# Altium footprint library Footprint-Lib-PhilsLab.PcbLib: 544 footprints (part 9 of 34)
Each footprint in its own frame and in the unit in brackets; x right, y up, seen from the top. Pads: shape width x height; smd on the part's side, far side on the other; paste and mask are expansions set on the pad; w line width, h text height; cw(c..) or ccw(c..) is an arc to the next point about the centre after c.
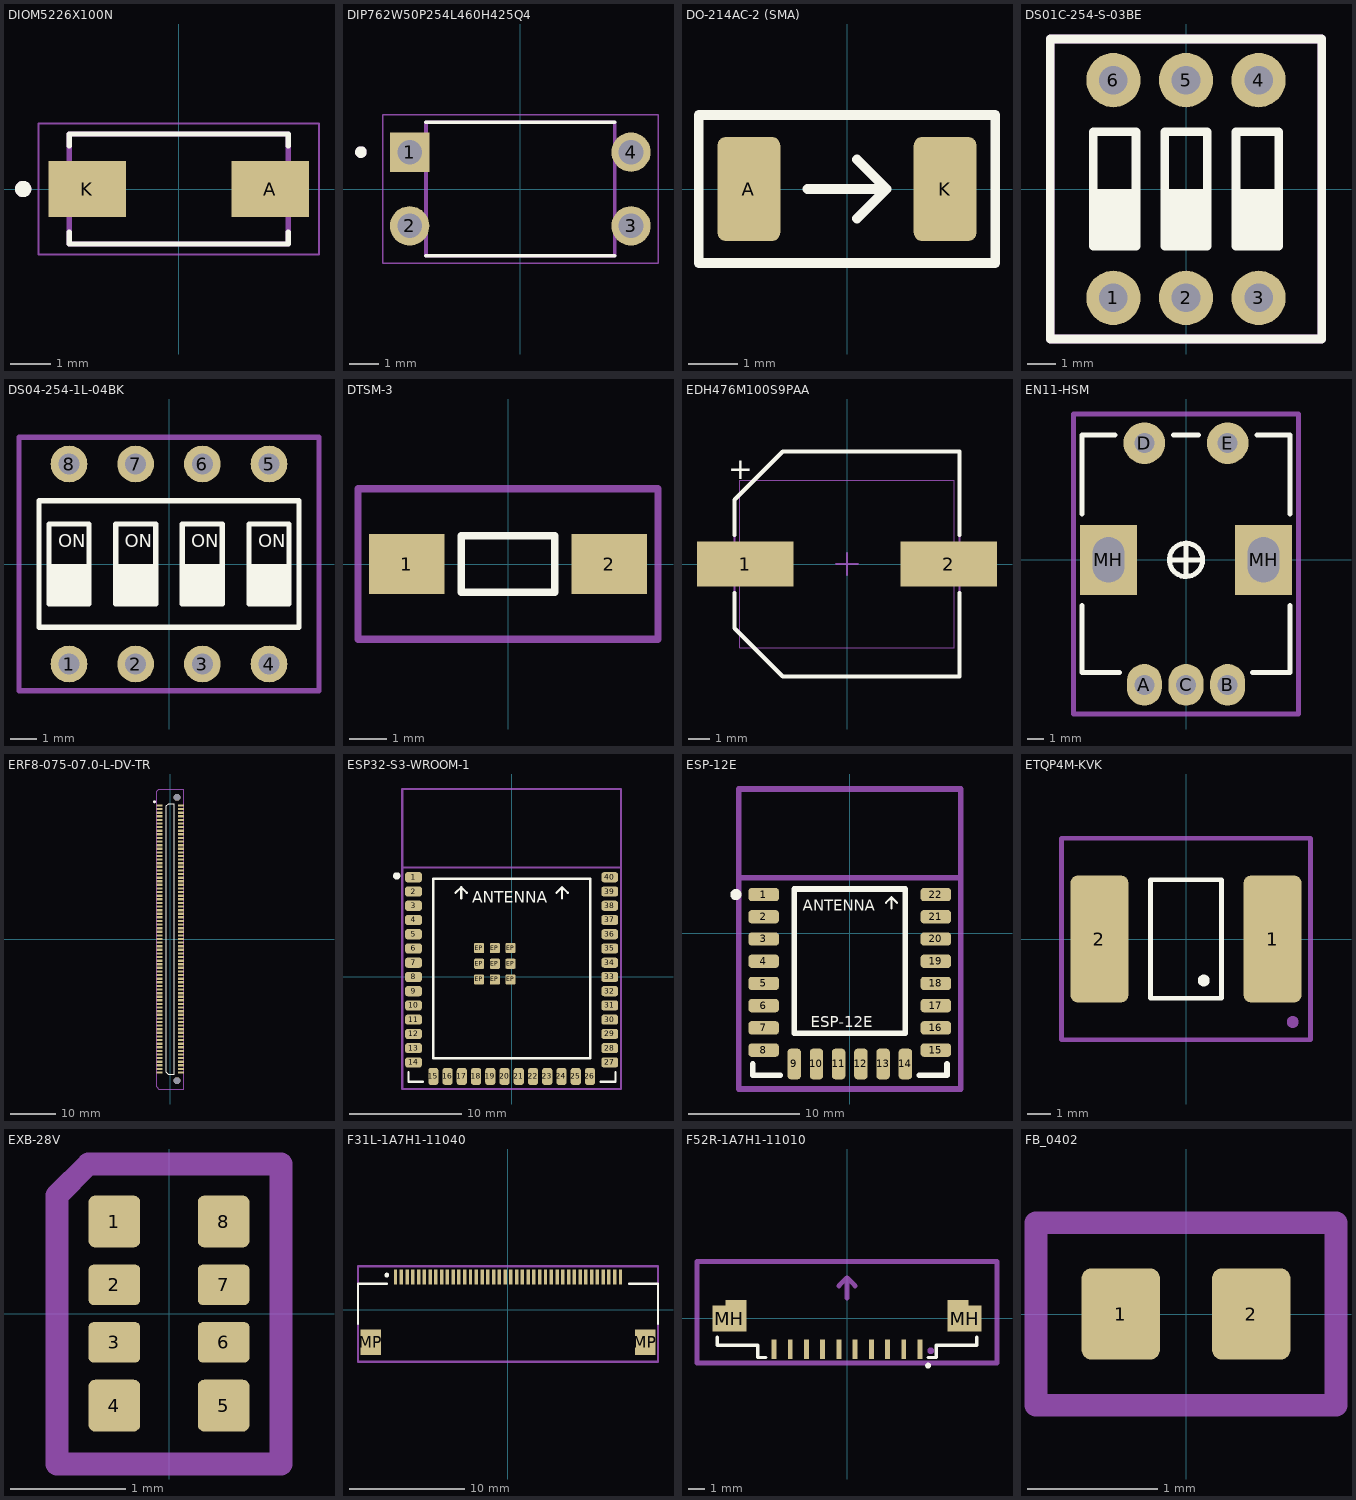
[diagram p8: the footprints below, top view; thin cyan lines are the x and y axes]

## DIOM5226X100N [mm]
pads (2):
  rect 1.89x1.38 smd: A(2.24,0) K(-2.24,0)
Top Overlay:
  circle w0.2: c-3.81,0 r0.1
  lines w0.127: -2.68,-1.05 -2.68,-1.35 2.68,-1.35 2.68,-1.05 ; -2.68,1.05 -2.68,1.35 2.68,1.35 2.68,1.05
Mechanical 13:
  circle w0.2: c-3.81,0 r0.1
  lines w0.127: -2.68,-1.35 -2.68,1.35 2.68,1.35 2.68,-1.35 -2.68,-1.35
Mechanical 15:
  lines w0.05: -3.435,-1.6 -3.435,1.6 3.435,1.6 3.435,-1.6 -3.435,-1.6
3D body "SS54FSH.STEP": height 1.1, standoff 0, extent -2.4,-1.149 2.3,1.349

## DIP762W50P254L460H425Q4 [mm]
height 4.25
pads (4):
  rect 1.358x1.358 / inner round 1.358 / far side rect 1.358x1.358 hole 0.85 mask+0.102: 1(-3.81,1.27)
  round 1.358 hole 0.85 mask+0.102: 2(-3.81,-1.27) 3(3.81,-1.27) 4(3.81,1.27)
Top Overlay:
  circle w0.2: c-5.489,1.27 r0.1
  lines w0.127: -3.25,-2.3 3.25,-2.3 ; -3.25,2.3 3.25,2.3
Mechanical 13:
  circle w0.2: c-5.489,1.27 r0.1
  lines w0.127: -3.25,-2.3 -3.25,2.3 3.25,2.3 3.25,-2.3 -3.25,-2.3
Mechanical 15:
  lines w0.05: -4.739,-2.55 -4.739,2.55 4.739,2.55 4.739,-2.55 -4.739,-2.55
3D body "step_temp.STEP": height 4.6, standoff -3.2, extent -3.94,-2.3 3.94,2.3

## DO-214AC-2 (SMA) [mm]
pads (2):
  rrect25% 1.27x2.1 smd: A(-1.985,0) K(1.985,0)
Top Overlay:
  lines w0.2: -0.8,0 0.8,0 ; 0.2,-0.6 0.8,0 ; 0.2,0.6 0.8,0 ; 0.8,0 0.8,0 ; -3,-1.5 -3,1.5 3,1.5 3,-1.5 -3,-1.5
Mechanical 13:
  text "'.Designator'" at -5.84,-0.925 h1
3D body "DO-214AC_SMA.step": height 2.42, standoff 0.01, extent -2.6,-1.3 2.6,1.3

## DS01C-254-S-03BE [mm]
pads (6):
  round 1.9 hole 1: 1(-2.54,-3.81) 2(0,-3.81) 3(2.54,-3.81) 4(2.54,3.81) 5(0,3.81) 6(-2.54,3.81)
Top Overlay:
  rectangle: 1.75,-2 3.25,0
  rectangle: -0.75,-2 0.75,0
  rectangle: -3.25,-2 -1.75,0
  lines w0.3: -4.75,-5.25 -4.75,5.25 4.75,5.25 4.75,-5.25 -4.75,-5.25 ; -3.25,-2 -1.75,-2 -1.75,2 -3.25,2 -3.25,-2 ; -0.75,-2 0.75,-2 0.75,2 -0.75,2 -0.75,-2 ; 1.75,-2 3.25,-2 3.25,2 1.75,2 1.75,-2
Mechanical 13:
  lines w0.3: -4.75,-5.25 -4.75,5.25 4.75,5.25 4.75,-5.25 -4.75,-5.25
  text "ON" at -4.083,3.5 h1
  text "'.Designator'" at -5.665,-0.417 h1
3D body "DS01-254-S-03BE.step": height 6.56, standoff -2.99, extent -4.525,-4.95 4.515,4.95

## DS04-254-1L-04BK [mm]
pads (8):
  round 1.4 hole 0.8: 1(-3.81,-3.81) 2(-1.27,-3.81) 3(1.27,-3.81) 4(3.81,-3.81) 5(3.81,3.81) 6(1.27,3.81) 7(-1.27,3.81) 8(-3.81,3.81)
Top Overlay:
  rectangle: -4.572,-1.524 -3.048,0
  rectangle: -2.032,-1.524 -0.508,0
  rectangle: 0.508,-1.524 2.032,0
  rectangle: 3.048,-1.524 4.572,0
  lines w0.2: -4.953,-2.413 -4.953,2.413 4.953,2.413 4.953,-2.413 -4.953,-2.413 ; -4.572,-1.524 -3.048,-1.524 -3.048,1.524 -4.572,1.524 -4.572,-1.524 ; -2.032,-1.524 -0.508,-1.524 -0.508,1.524 -2.032,1.524 -2.032,-1.524 ; 0.508,-1.524 2.032,-1.524 2.032,1.524 0.508,1.524 0.508,-1.524 ; 3.048,-1.524 4.572,-1.524 4.572,1.524 3.048,1.524 3.048,-1.524
  text "ON" at -4.227,0.639 h0.5
  text "ON" at -1.687,0.639 h0.5
  text "ON" at 0.853,0.639 h0.5
  text "ON" at 3.393,0.639 h0.5
Mechanical 13:
  lines w0.2: -5.715,-4.826 -5.715,4.826 5.715,4.826 5.715,-4.826 -5.715,-4.826
  text ".Designator" at -4.998,-0.333 h1
  text "ON" at -4.643,1.532 h1
3D body "DS04-254-1L-04BK.step": height 4.04, standoff -4.45, extent -5.577,-3.912 5.583,3.958

## DTSM-3 [mm]
pads (2):
  rect 2x1.6 smd: 1(-2.7,0) 2(2.7,0)
Top Overlay:
  lines w0.2: -1.25,-0.75 1.25,-0.75 1.25,0.75 -1.25,0.75 -1.25,-0.75
Mechanical 13:
  lines w0.2: -4,-2 4,-2 4,2 -4,2 -4,-2
  text ".Designator" at -4.998,-0.333 h1
3D body "DTSM-32.STEP": height 4.96, standoff -0.04, extent -3.6,-1.75 3.6,1.75

## EDH476M100S9PAA [mm]
height 10.5
pads (2):
  rect 4.5x2.1 smd: 1(-4.75,0) 2(4.75,0)
Top Overlay:
  lines w0.2: -5.25,-1.35 -5.25,-3 -3,-5.25 5.25,-5.25 5.25,-1.35 ; -5.25,1.35 -5.25,3 -3,5.25 5.25,5.25 5.25,1.35
  text "+" at -5.55,3.95 h1
Mechanical 13:
  lines w0.1: -5.25,-3 -3,-5.25 5.25,-5.25 5.25,5.25 -3,5.25 -5.25,3 -5.25,-3
  text "'.Designator'" at -5.815,-0.9 h1
  text "+" at -10.565,3.85 h1
Mechanical 15:
  lines w0.05: -5,-3.9 -5,3.9 5,3.9 5,-3.9 -5,-3.9
  lines w0.1: -0.5,0 0.5,0 ; 0,-0.5 0,0.5
3D body "EDH476M100S9PAA.stp": height 10.52, standoff 0.01, extent -6.1,-5.25 6.1,5.25

## EN11-HSM [mm]
pads (7):
  oval 2.1x2.5 hole 1.2: A(-2.5,-7.5) B(2.5,-7.5) C(0,-7.5)
  round 2.5 hole 1.2: D(-2.5,7) E(2.5,7)
  rect 3.4x4.2 hole 1.9 slot 2.7 at 90 deg: MH(-4.65,0) MH(4.65,0)
Top Overlay:
  circle w0.3: c0,0 r1
  lines w0.3: -6.25,-2.75 -6.25,-6.75 -4,-6.75 ; -6.25,2.75 -6.25,7.5 -4.25,7.5 ; -1,0 1,0 ; -0.75,7.5 0.75,7.5 ; 0,-1 0,1 ; 4,-6.75 6.25,-6.75 6.25,-2.75 ; 4.25,7.5 6.25,7.5 6.25,2.75
Mechanical 13:
  lines w0.3: -6.75,-9.25 -6.75,8.75 6.75,8.75 6.75,-9.25 -6.75,-9.25
  text "'.Designator'" at -5.665,-0.417 h1
3D body "EN11-HSM1AF15.STEP": height 21.65, standoff -3.45, extent -5.85,-7.625 5.85,7.25

## ERF8-075-07.0-L-DV-TR [mm]
pads (152):
  rect 1.4x0.5 smd: 1(-2.4,29.6) 2(2.4,29.6) 3(-2.4,28.8) 4(2.4,28.8) 5(-2.4,28) 6(2.4,28) 7(-2.4,27.2) 8(2.4,27.2) 9(-2.4,26.4) 10(2.4,26.4) 11(-2.4,25.6) 12(2.4,25.6) 13(-2.4,24.8) 14(2.4,24.8) 15(-2.4,24) 16(2.4,24) 17(-2.4,23.2) 18(2.4,23.2) 19(-2.4,22.4) 20(2.4,22.4) 21(-2.4,21.6) 22(2.4,21.6) 23(-2.4,20.8) 24(2.4,20.8) 25(-2.4,20) 26(2.4,20) 27(-2.4,19.2) 28(2.4,19.2) 29(-2.4,18.4) 30(2.4,18.4) 31(-2.4,17.6) 32(2.4,17.6) 33(-2.4,16.8) 34(2.4,16.8) 35(-2.4,16) 36(2.4,16) 37(-2.4,15.2) 38(2.4,15.2) 39(-2.4,14.4) 40(2.4,14.4) 41(-2.4,13.6) 42(2.4,13.6) 43(-2.4,12.8) 44(2.4,12.8) 45(-2.4,12) 46(2.4,12) 47(-2.4,11.2) 48(2.4,11.2) 49(-2.4,10.4) 50(2.4,10.4) 51(-2.4,9.6) 52(2.4,9.6) 53(-2.4,8.8) 54(2.4,8.8) 55(-2.4,8) 56(2.4,8) 57(-2.4,7.2) 58(2.4,7.2) 59(-2.4,6.4) 60(2.4,6.4) 61(-2.4,5.6) 62(2.4,5.6) 63(-2.4,4.8) 64(2.4,4.8) 65(-2.4,4) 66(2.4,4) 67(-2.4,3.2) 68(2.4,3.2) 69(-2.4,2.4) 70(2.4,2.4) 71(-2.4,1.6) 72(2.4,1.6) 73(-2.4,0.8) 74(2.4,0.8) 75(-2.4,0) 76(2.4,0) 77(-2.4,-0.8) 78(2.4,-0.8) 79(-2.4,-1.6) 80(2.4,-1.6) 81(-2.4,-2.4) 82(2.4,-2.4) 83(-2.4,-3.2) 84(2.4,-3.2) 85(-2.4,-4) 86(2.4,-4) 87(-2.4,-4.8) 88(2.4,-4.8) 89(-2.4,-5.6) 90(2.4,-5.6) 91(-2.4,-6.4) 92(2.4,-6.4) 93(-2.4,-7.2) 94(2.4,-7.2) 95(-2.4,-8) 96(2.4,-8) 97(-2.4,-8.8) 98(2.4,-8.8) 99(-2.4,-9.6) 100(2.4,-9.6) 101(-2.4,-10.4) 102(2.4,-10.4) 103(-2.4,-11.2) 104(2.4,-11.2) 105(-2.4,-12) 106(2.4,-12) 107(-2.4,-12.8) 108(2.4,-12.8) 109(-2.4,-13.6) 110(2.4,-13.6) 111(-2.4,-14.4) 112(2.4,-14.4) 113(-2.4,-15.2) 114(2.4,-15.2) 115(-2.4,-16) 116(2.4,-16) 117(-2.4,-16.8) 118(2.4,-16.8) 119(-2.4,-17.6) 120(2.4,-17.6) 121(-2.4,-18.4) 122(2.4,-18.4) 123(-2.4,-19.2) 124(2.4,-19.2) 125(-2.4,-20) 126(2.4,-20) 127(-2.4,-20.8) 128(2.4,-20.8) 129(-2.4,-21.6) 130(2.4,-21.6) 131(-2.4,-22.4) 132(2.4,-22.4) 133(-2.4,-23.2) 134(2.4,-23.2) 135(-2.4,-24) 136(2.4,-24) 137(-2.4,-24.8) 138(2.4,-24.8) 139(-2.4,-25.6) 140(2.4,-25.6) 141(-2.4,-26.4) 142(2.4,-26.4) 143(-2.4,-27.2) 144(2.4,-27.2) 145(-2.4,-28) 146(2.4,-28) 147(-2.4,-28.8) 148(2.4,-28.8) 149(-2.4,-29.6) 150(2.4,-29.6)
  round 1.5 hole 1.5 unplated: MH(1.5,-31.4) MH(1.5,31.4)
Top Overlay:
  circle w0.3: c-3.498,30.405 r0.15
  lines w0.2: -0.865,-29.535 -0.865,29.5 -0.365,30 0.865,30 0.865,-30 -0.4,-30 -0.865,-29.535
Mechanical 13:
  circle w0.3: c-3.496,30.405 r0.15
  lines w0.25: -3,-32.75 -3,32.75 -2.5,33.25 3,33.25 3,-33.25 -2.5,-33.25 -3,-32.75
  text "'.Designator'" at -5.815,-0.9 h1
3D body "ERF8-075-07.0-L-DV-TR.stp": height 7.28, standoff -1.01, extent -2.8,-33 2.8,33

## ESP32-S3-WROOM-1 [mm]
pads (49):
  rrect50% 1.5x0.9 smd: 1(-8.75,8.88) 2(-8.75,7.61) 3(-8.75,6.34) 4(-8.75,5.07) 5(-8.75,3.8) 6(-8.75,2.53) 7(-8.75,1.26) 8(-8.75,-0.01) 9(-8.75,-1.28) 10(-8.75,-2.55) 11(-8.75,-3.82) 12(-8.75,-5.09) 13(-8.75,-6.36) 14(-8.75,-7.63) 27(8.75,-7.63) 28(8.75,-6.36) 29(8.75,-5.09) 30(8.75,-3.82) 31(8.75,-2.55) 32(8.75,-1.28) 33(8.75,-0.01) 34(8.75,1.26) 35(8.75,2.53) 36(8.75,3.8) 37(8.75,5.07) 38(8.75,6.34) 39(8.75,7.61) 40(8.75,8.88)
  rrect50% 0.9x1.5 smd: 15(-6.985,-8.88) 16(-5.715,-8.88) 17(-4.445,-8.88) 18(-3.175,-8.88) 19(-1.905,-8.88) 20(-0.635,-8.88) 21(0.635,-8.88) 22(1.905,-8.88) 23(3.175,-8.88) 24(4.445,-8.88) 25(5.715,-8.88) 26(6.985,-8.88)
  rrect25% 0.9x0.9 smd: EP(-2.9,-0.235) EP(-2.9,1.165) EP(-2.9,2.565) EP(-1.5,-0.235) EP(-1.5,1.165) EP(-1.5,2.565) EP(-0.1,-0.235) EP(-0.1,1.165) EP(-0.1,2.565)
Top Overlay:
  circle w0.35: c-10.25,9 r0.15
  lines w0.2: -9.2,-8.5 -9.2,-9.364 -7.9,-9.364 ; -5,7.5 -4.5,8 ; -4.5,7 -4.5,8 ; -4,7.5 -4.5,8 ; 4,7.5 4.5,8 ; 4.5,7 4.5,8 ; 5,7.5 4.5,8 ; 7.95,-9.364 9.25,-9.364 9.25,-8.5 ; -7,-7.25 -7,8.75 7,8.75 7,-7.25 -7,-7.25
  text "ANTENNA" at -3.532,6.6 h1
Mechanical 13:
  circle w0.35: c-8.796,8.893 r0.15
  lines w0.2: -9.75,9.75 9.75,9.75 ; -9.75,-10 -9.75,16.75 9.75,16.75 9.75,-10 -9.5,-10 -9.75,-10
  text "'.Designator'" at -5.815,-0.9 h1
  text "ANTENNA / KEEP-OUT" at -7.964,10.391 h2
3D body "ESP32-S3-WROOM.step": height 3.18, standoff 0.02, extent -9.01,-9.14 9.01,16.37

## ESP-12E [mm]
pads (22):
  rrect50% 2.75x1.2 smd: 1(-7.75,3.5) 2(-7.75,1.5) 3(-7.75,-0.5) 4(-7.75,-2.5) 5(-7.75,-4.5) 6(-7.75,-6.5) 7(-7.75,-8.5) 8(-7.75,-10.5) 15(7.75,-10.5) 16(7.75,-8.5) 17(7.75,-6.5) 18(7.75,-4.5) 19(7.75,-2.5) 20(7.75,-0.5) 21(7.75,1.5) 22(7.75,3.5)
  rrect50% 1.2x2.75 smd: 9(-5,-11.75) 10(-3,-11.75) 11(-1,-11.75) 12(1,-11.75) 13(3,-11.75) 14(5,-11.75)
Top Overlay:
  circle w0.5: c-10.25,3.5 r0.25
  lines w0.2: 3.25,2.75 3.75,3.25 ; 3.75,2.25 3.75,3.25 ; 4.25,2.75 3.75,3.25
  lines w0.5: -8.75,-11.75 -8.75,-12.75 -6.25,-12.75 ; 6.25,-12.75 8.75,-12.75 8.75,-11.75 ; -5,-9 5,-9 5,4 -5,4 -5,-9
  text "ANTENNA" at -4.25,2.05 h1
  text "ESP-12E" at -3.532,-8.45 h1
Mechanical 13:
  circle w0.5: c-7.75,3.5 r0.25
  lines w0.5: -10,5 10,5 ; -10,-14 -10,13 10,13 10,-14 0,-14 -10,-14
  text "'.Designator'" at -5.815,-0.9 h1
  text "ANTENNA / KEEP-OUT" at -5.948,6.911 h1.5
3D body "ESP-12E.step": height 2.66, standoff -0.02, extent -8.005,-12.005 8.005,12

## ETQP4M-KVK [mm]
pads (2):
  rrect25% 2.45x5.35 smd: 1(3.65,0) 2(-3.65,0)
Top Overlay:
  circle w0.3: c0.75,-1.75 r0.101
  lines w0.2: -1.5,-2.5 1.5,-2.5 1.5,2.5 -1.5,2.5 -1.5,-2.5
Mechanical 13:
  circle w0.3: c4.5,-3.5 r0.101
  lines w0.2: -5.25,-4.25 5.25,-4.25 5.25,4.25 -5.25,4.25 -5.25,-4.25
  text "'.Designator'" at -5.665,-0.417 h1
3D body "ETQ-P4M2R2KVK.stp": height 4.01, standoff 0.01, extent -4.25,-4 4.25,4

## EXB-28V [mm]
pads (8):
  rrect25% 0.45x0.45 smd mask+0.1: 1(-0.475,0.8) 4(-0.475,-0.8) 5(0.475,-0.8) 8(0.475,0.8)
  rrect25% 0.45x0.35 smd mask+0.1: 2(-0.475,0.25) 3(-0.475,-0.25) 6(0.475,-0.25) 7(0.475,0.25)
Mechanical 13:
  lines w0.2: -0.975,-1.308 0.975,-1.308 0.975,1.3 -0.7,1.3 -0.975,1.025 -0.975,-1.308
  text "'.Designator'" at -5.665,-0.417 h1
3D body "R-Array-0402.step": height 0.45, standoff 0, extent -0.5,-1 0.5,1

## F31L-1A7H1-11040 [mm]
pads (42):
  rect 0.3x1.3 smd: 1(-9.75,2.825) 2(-9.25,2.825) 3(-8.75,2.825) 4(-8.25,2.825) 5(-7.75,2.825) 6(-7.25,2.825) 7(-6.75,2.825) 8(-6.25,2.825) 9(-5.75,2.825) 10(-5.25,2.825) 11(-4.75,2.825) 12(-4.25,2.825) 13(-3.75,2.825) 14(-3.25,2.825) 15(-2.75,2.825) 16(-2.25,2.825) 17(-1.75,2.825) 18(-1.25,2.825) 19(-0.75,2.825) 20(-0.25,2.825) 21(0.25,2.825) 22(0.75,2.825) 23(1.25,2.825) 24(1.75,2.825) 25(2.25,2.825) 26(2.75,2.825) 27(3.25,2.825) 28(3.75,2.825) 29(4.25,2.825) 30(4.75,2.825) 31(5.25,2.825) 32(5.75,2.825) 33(6.25,2.825) 34(6.75,2.825) 35(7.25,2.825) 36(7.75,2.825) 37(8.25,2.825) 38(8.75,2.825) 39(9.25,2.825) 40(9.75,2.825)
  rect 1.8x2.2 smd: MP(-11.9,-2.825) MP(11.9,-2.825)
Top Overlay:
  circle w0.254: c-10.5,3 r0.079
  lines w0.2: -13,-1.25 -13,2.25 -10.5,2.25 ; 10.5,2.25 13,2.25 13,-1.25
Mechanical 13:
  lines w0.2: -13,-4.5 13,-4.5 13,3.75 -13,3.75 -13,-4.5
  text ".Designator" at -4.998,-0.333 h1
3D body "F31L-1A7H1-11040.step": height 2.5, standoff -0.05, extent -12.65,-4.425 12.65,3.145

## F52R-1A7H1-11010 [mm]
pads (14):
  rect 0.3x1.2 smd: 1(4.5,-1.913) 2(3.5,-1.913) 3(2.5,-1.913) 4(1.5,-1.913) 5(0.5,-1.913) 6(-0.5,-1.913) 7(-1.5,-1.913) 8(-2.5,-1.913) 9(-3.5,-1.913) 10(-4.5,-1.913)
  rect 2.1x1.6 smd: MH(-7.25,-0.013) MH(7.25,-0.013)
  rect 1.3x0.35 smd: MH(-6.85,0.962) MH(6.85,0.962)
Top Overlay:
  circle w0.254: c5,-2.913 r0.05
  lines w0.2: -8,-1.162 -8,-1.663 -5.5,-1.663 -5.5,-2.412 -5,-2.412 ; 5,-2.412 5.5,-2.412 5.5,-1.663 8,-1.663 8,-1.162
Mechanical 13:
  circle w0.254: c5.159,-2 r0.079
  lines w0.3: -0.5,2 0,2.5 ; 0,1.25 0,2.5 ; 0.5,2 0,2.5 ; -9.25,-2.75 -9.25,3.5 9.25,3.5 9.25,-2.75 -8.75,-2.75 -9.25,-2.75
  text "'.Designator'" at -5.665,-0.417 h1
3D body "f52r_10pin_asm.stp": height 2.06, standoff 0.01, extent -8.9,-2.412 8.9,3.088

## FB_0402 [mm]
pads (2):
  rrect25% 0.6x0.7 smd: 1(-0.5,0) 2(0.5,0)
Mechanical 13:
  lines w0.175: -1.15,-0.7 -1.15,0.7 1.15,0.7 1.15,-0.7 -1.15,-0.7
  text "'.Designator'" at -5.665,-0.417 h1
3D body "FB0402.stp": height 0.51, standoff 0.01, extent -0.5,-0.25 0.5,0.25